# Altium footprint library 2020-05-10_21-07-00.PcbLib: 1 footprints
Each footprint in its own frame and in the unit in brackets; x right, y up, seen from the top. Pads: shape width x height; smd on the part's side, far side on the other; paste and mask are expansions set on the pad; w line width, h text height; cw(c..) or ccw(c..) is an arc to the next point about the centre after c.
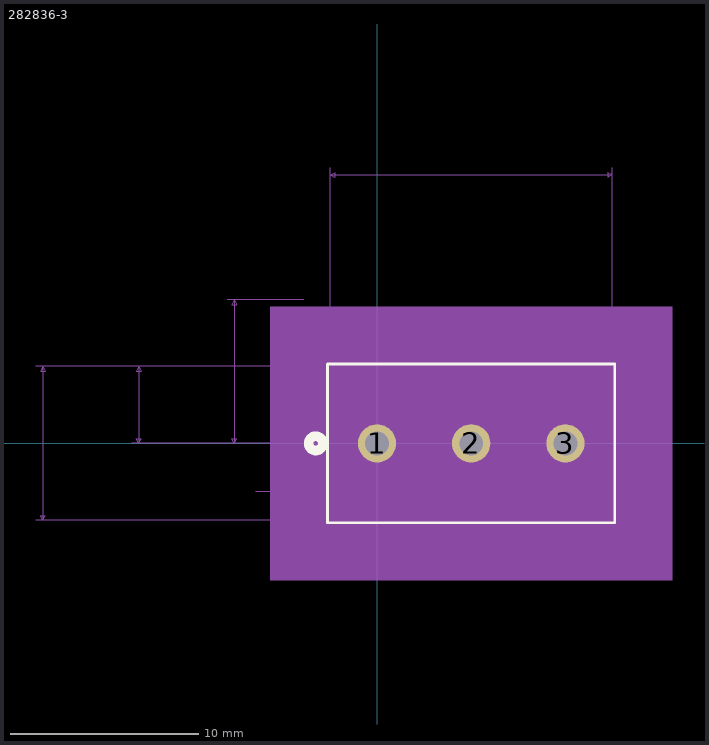
[diagram p0: the footprint, top view; thin cyan lines are the x and y axes]

## 282836-3 [mil]
pads (3):
  round 80 hole 50: 1(0,0) 2(196.85,0) 3(393.7,0)
Top Overlay:
  circle w20: c-128.15,0 r15
  lines w6: -103.15,-166 496.85,-166 496.85,166 -103.15,166 -103.15,-166
Bottom Overlay:
  circle w20: c-128.15,0 r15
Mechanical 5:
  region: -223.15,286 616.85,286 616.85,-286 -223.15,-286
Mechanical 7:
  lines w1: -713.15,-161 -98.15,-161 ; -713.15,161 -98.15,161 ; -513.15,0 196.85,0 ; -513.15,161 -98.15,161 ; -313.15,0 196.85,0 ; -313.15,300 -153.15,300 ; -253.15,-100 -213.15,-100 ; -213.15,0 196.85,0 ; -198.15,-150 -198.15,-100 ; -198.15,50 -198.15,0 ; -98.15,576 -98.15,161 ; 0,0 0,276 ; 196.85,276 196.85,0 ; 491.85,161 491.85,576 ; 591.85,-50 591.85,0 ; 591.85,50 591.85,0 ; -698.15,-161 -698.15,161 ; -698.15,-161 -703.15,-151 -693.15,-151 -698.15,-161 ; -698.15,161 -703.15,151 -693.15,151 -698.15,161 ; -498.15,0 -498.15,161 ; -498.15,0 -503.15,10 -493.15,10 -498.15,0 ; -498.15,161 -503.15,151 -493.15,151 -498.15,161 ; -298.15,0 -298.15,300 ; -298.15,0 -303.15,10 -293.15,10 -298.15,0 ; -298.15,300 -303.15,290 -293.15,290 -298.15,300 ; -198.15,-100 -203.15,-110 -193.15,-110 -198.15,-100 ; -198.15,0 -203.15,10 -193.15,10 -198.15,0 ; -98.15,561 491.85,561 ; -98.15,561 -88.15,566 -88.15,556 -98.15,561 ; 0,261 196.85,261 ; 0,261 10,266 10,256 0,261 ; 196.85,261 186.85,266 186.85,256 196.85,261 ; 491.85,561 481.85,566 481.85,556 491.85,561 ; 591.85,0 586.85,10 596.85,10 591.85,0 ; 591.85,0 586.85,-10 596.85,-10 591.85,0 ; 393.7,0 606.85,0 393.7,0
  text "Default Padstyle: EX80Y80D50P" at -165.65,-311 h50
  text "1st Mtg Padstyle: RX80Y80D50P" at -165.65,-386 h50
  text "2nd Mtg Padstyle: EX70Y70D70P" at -165.65,-461 h50
  text "3rd Mtg Padstyle: EX70Y70D70P" at -165.65,-536 h50
  text "Left Mtg Padstyle: EX60Y60D30P" at -178.15,-611 h50
  text "Right Mtg Padstyle: EX60Y60D30P" at -190.65,-686 h50
  text "Alt Padstyle 1: OX60Y90D30P" at -140.65,-761 h50
  text "Alt Padstyle 2: OX90Y60D30P" at -140.65,-836 h50
  text "0.1968504in/5mm" at 4.68,281 h25
  text "0.59in/14.986mm" at 103.1,581 h25
  text "0in/0mm" at 611.85,-12.5 h25
  text "0in/0mm" at -305.65,-62.5 h25
  text "0.3in/7.62mm" at -468.15,137.5 h25
  text "0.161in/4.089mm" at -705.65,68 h25
  text "0.322in/8.179mm" at -905.65,-12.5 h25
Mechanical 13:
  circle w20: c0,75 r15
  lines w1: -98.15,-161 491.85,-161 491.85,161 -98.15,161 -98.15,-161
Mechanical 15:
  region: 501.85,171 -108.15,171 -108.15,-171 501.85,-171
  lines w6: -108.15,-171 -108.15,171 501.85,171 501.85,-171 -108.15,-171
3D body: height 10, standoff 0, extent 0,0 10,10